# Altium footprint library Tony_.PcbLib: 94 footprints (part 6 of 6)
Each footprint in its own frame and in the unit in brackets; x right, y up, seen from the top. Pads: shape width x height; smd on the part's side, far side on the other; paste and mask are expansions set on the pad; w line width, h text height; cw(c..) or ccw(c..) is an arc to the next point about the centre after c.
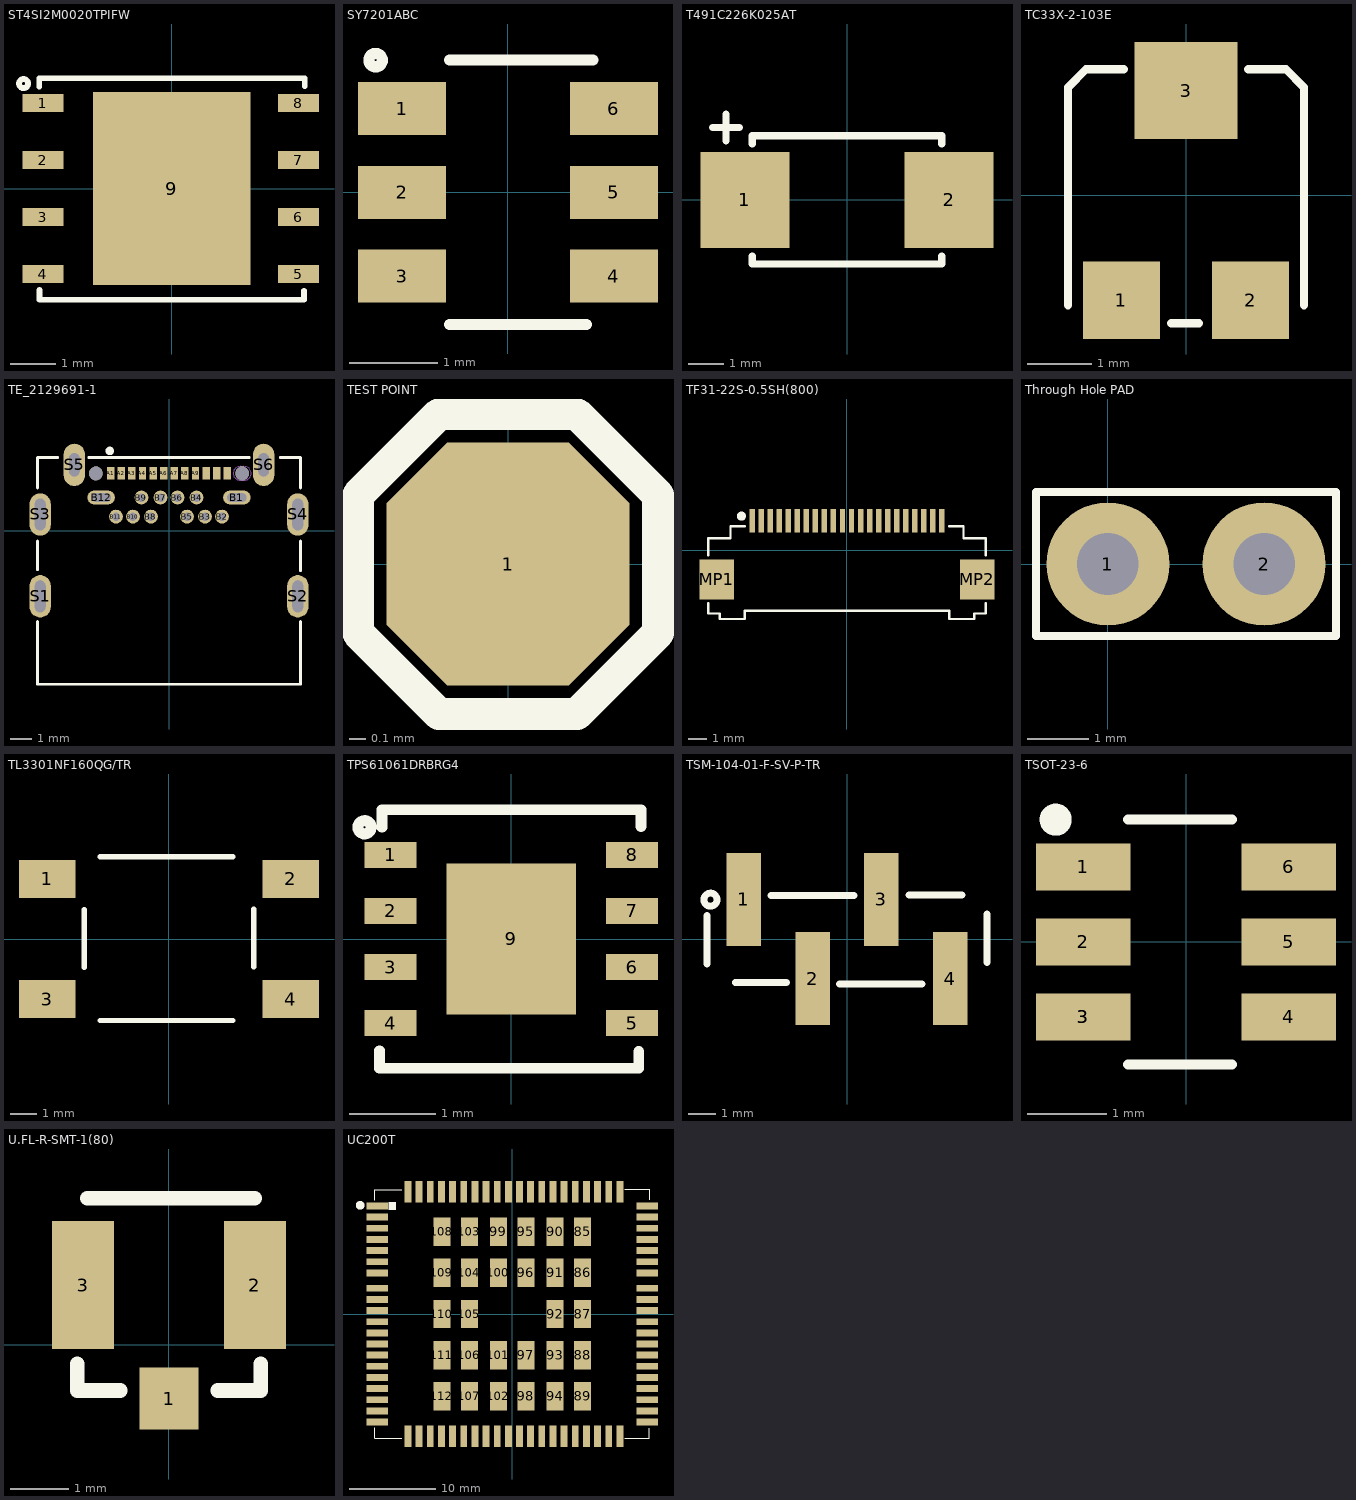
[diagram p5: the footprints below, top view; thin cyan lines are the x and y axes]

## ST4SI2M0020TPIFW [mil] "GSMA ESIM SYSTEM-ON-CHIP FOR SEC"
pads (9):
  rect 36x16 smd: 1(-113,75) 2(-113,25) 3(-113,-25) 4(-113,-75) 5(111,-75) 6(111,-25) 7(111,25) 8(111,75)
  rect 138x169 smd: 9(0,0)
Top Overlay:
  circle w5: c-130,92 r4
  lines w5: -116.18,89.2 -116.18,96.65 116.54,96.65 116.54,89.76 ; -116.11,-88.93 -116.11,-97.42 115.89,-97.42 115.89,-89.49
3D body "SON_IM-200M_STM.step": height 39.09, standoff 0, extent -117.99,-98.5 118,98.51

## SY7201ABC [mm] "SOT-23-6 LED Drivers ROHS"
pads (6):
  rect 1x0.6 smd: 1(-1.2,0.95) 2(-1.2,0) 3(-1.2,-0.95) 4(1.2,-0.95) 5(1.2,0) 6(1.2,0.95)
Top Overlay:
  circle w0.127: c-1.5,1.499 r0.076
  lines w0.127: -0.662,-1.499 0.887,-1.499 ; -0.662,1.499 0.964,1.499
3D body "User Library-SOT23-6-2.step": height 1.44, standoff -0.01, extent -1.4,-1.45 1.4,1.45

## T491C226K025AT [mm]
pads (2):
  rect 2.5x2.7 smd: 1(-2.87,0) 2(2.87,0)
Top Overlay:
  lines w0.2: -3.785,2.032 -3.023,2.032 ; -3.404,1.651 -3.404,2.413 ; -2.667,-1.575 -2.667,-1.803 2.667,-1.803 2.667,-1.575 ; -2.667,1.575 -2.667,1.803 2.667,1.803 2.667,1.575
3D body "User Library-CAP_TANT_6032-28_y.step": height 2.8, standoff 0, extent -3.15,-1.75 3.15,1.75

## TC33X-2-103E [mm]
pads (3):
  rect 1.2x1.2 smd: 1(-1,-1.625) 2(1,-1.625)
  rect 1.6x1.5 smd: 3(0,1.625)
Top Overlay:
  lines w0.127: -1.829,-1.702 -1.829,1.676 -1.549,1.956 -0.965,1.956 ; -0.229,-1.981 0.203,-1.981 ; 0.965,1.956 1.549,1.956 1.829,1.676 1.829,-1.702
3D body "TC-33X-2.stp": height 1.13, standoff -0.02, extent -1.8,-1.912 1.8,2.05

## TE_2129691-1 [mm]
pads (32):
  rect 0.35x0.6 smd: A1(-2.75,2.7) A2(-2.25,2.7) A3(-1.75,2.7) A4(-1.25,2.7) A5(-0.75,2.7) A6(-0.25,2.7) A7(0.25,2.7) A8(0.75,2.7) A9(1.25,2.7) A10(1.75,2.7) A11(2.25,2.7) A12(2.75,2.7)
  oval 1.3x0.65 hole 0.4 slot 0.9 at 0 deg: B1(3.2,1.56) B12(-3.2,1.56)
  round 0.65 hole 0.4: B2(2.5,0.66) B3(1.7,0.66) B4(1.3,1.56) B5(0.85,0.66) B6(0.4,1.56) B7(-0.4,1.56) B8(-0.85,0.66) B9(-1.3,1.56) B10(-1.7,0.66) B11(-2.5,0.66)
  oval 1x2 hole 0.5 slot 1.5 at 90 deg: S1(-6.075,-3.1) S2(6.075,-3.1) S3(-6.075,0.76) S4(6.075,0.76)
  oval 1x2 hole 0.5 slot 1.1 at 90 deg: S5(-4.465,3.1) S6(4.465,3.1)
  round 0.65 hole 0.65 unplated: ""(-3.45,2.7) ""(3.45,2.7)
Top Overlay:
  circle w0.2: c-2.794,3.759 r0.1
  lines w0.127: -6.2,-4.29 -6.2,-7.25 6.2,-7.25 6.2,-4.29 ; -6.2,-1.84 -6.2,-0.49 ; -6.2,2.01 -6.2,3.45 -5.25,3.45 ; -3.78,3.45 3.78,3.45 ; 5.25,3.45 6.2,3.45 6.2,2.01 ; 6.2,-1.89 6.2,-0.49
Mechanical 1:
  lines w0: 3.025,2.698 cw(c3.357,2.693) 3.363,3.025 ; 3.025,2.702 ccw(c3.357,2.708) 3.363,2.375 ; 3.365,2.375 3.535,2.375 ; 3.365,3.025 3.535,3.025 ; 3.537,2.375 ccw(c3.542,2.708) 3.875,2.702 ; 3.537,3.025 cw(c3.542,2.693) 3.875,2.698
3D body "2129691-1--3DModel-STEP-56544.STEP": height 2.25, standoff -1.08, extent -6.175,-7.204 6.175,3.496

## TEST POINT [mil]
pads (1):
  oct 60x60 smd: 1(0,0)
Top Overlay:
  lines w7.87: -17,-37 17,-37 ; -17,-37 -37,-17 -37,17 -17,37 ; -17,-37 17,-37 ; -17,37 17,37 ; -17,37 17,37 ; 17,-37 37,-17 37,17 17,37

## TF31-22S-0.5SH(800) [mm] "CONN FFC 22POS 0.50MM SMD"
pads (24):
  rect 0.3x1.3 smd: 1(-5.25,1.625) 2(-4.75,1.625) 3(-4.25,1.625) 4(-3.75,1.625) 5(-3.25,1.625) 6(-2.75,1.625) 7(-2.25,1.625) 8(-1.75,1.625) 9(-1.25,1.625) 10(-0.75,1.625) 11(-0.25,1.625) 12(0.25,1.625) 13(0.75,1.625) 14(1.25,1.625) 15(1.75,1.625) 16(2.25,1.625) 17(2.75,1.625) 18(3.25,1.625) 19(3.75,1.625) 20(4.25,1.625) 21(4.75,1.625) 22(5.25,1.625)
  rect 1.9x2.2 smd: MP1(-7.2,-1.625) MP2(7.2,-1.625)
Top Overlay:
  circle w0.254: c-5.842,1.88 r0.127
  lines w0.127: -7.671,-2.946 -7.671,-3.505 -7.036,-3.505 -7.036,-3.81 -5.664,-3.81 -5.664,-3.353 5.664,-3.353 5.664,-3.81 7.036,-3.81 7.036,-3.505 7.671,-3.505 7.671,-2.946 ; -7.671,-0.277 -7.671,0.66 -6.452,0.66 -6.452,1.321 -5.639,1.321 ; 5.639,1.321 6.452,1.321 6.452,0.66 7.671,0.66 7.671,-0.277
3D body "TF31-22S-0.5SH_3d_stp.stp": height 1.97, standoff -0.03, extent -7.65,-3.785 7.65,1.966

## Through Hole PAD [mm]
pads (2):
  round 2 hole 1: 1(0,0) 2(2.54,0)
Top Overlay:
  lines w0.127: -1.168,-1.168 3.708,-1.168 3.708,1.168 -1.168,1.168 -1.168,-1.168

## TL3301NF160QG/TR [mm] "Tactile Switch SPST-NO Top Actuated Surface Mount"
pads (4):
  rect 2.12x1.42 smd: 1(-4.55,2.25) 2(4.55,2.25) 3(-4.55,-2.25) 4(4.55,-2.25)
Top Overlay:
  lines w0.2: -3.175,-1.067 -3.175,1.092 ; -2.565,-3.048 2.388,-3.048 ; -2.565,3.073 2.388,3.073 ; 3.175,-1.041 3.175,1.118
3D body "TL3301NFxxxxG.stp": height 4.41, standoff 0.01, extent -5,-3 5,3

## TPS61061DRBRG4 [mm] "IC LED DRVR RGLTR DIM 400MA 8SON"
pads (9):
  rect 0.6x0.3 smd: 1(-1.4,0.975) 2(-1.4,0.325) 3(-1.4,-0.325) 4(-1.4,-0.975) 5(1.4,-0.975) 6(1.4,-0.325) 7(1.4,0.325) 8(1.4,0.975)
  rect 1.5x1.75 smd: 9(0,0)
Top Overlay:
  circle w0.127: c-1.702,1.295 r0.076
  lines w0.127: -1.527,-1.295 -1.527,-1.499 1.477,-1.499 1.477,-1.302 ; -1.499,1.295 -1.499,1.499 1.506,1.499 1.506,1.302
3D body "TPS61061DRBRG4.STEP": height 1, standoff 0, extent -1.5,-1.5 1.5,1.5

## TSM-104-01-F-SV-P-TR [mm]
pads (4):
  rect 1.27x3.43 smd: 1(-3.81,1.46) 2(-1.27,-1.46) 3(1.27,1.46) 4(3.81,-1.46)
Top Overlay:
  circle w0.254: c-5.029,1.448 r0.241
  lines w0.254: -5.156,-0.914 -5.156,0.864 ; -4.115,-1.6 -2.235,-1.6 ; -2.794,1.6 0.254,1.6 ; -0.279,-1.651 2.769,-1.651 ; 2.286,1.626 4.242,1.626 ; 5.156,-0.864 5.156,0.914
3D body "TSM-104-01-F-SV-P-TR.stp": height 10.9, standoff -0.02, extent -5.08,-2.642 5.08,2.642

## TSOT-23-6 [mm]
pads (7):
  rect 1.2x0.6 smd: 1(-1.3,0.95) 2(-1.3,0) 3(-1.3,-0.95) 3(-1.3,-0.95) 4(1.3,-0.95) 5(1.3,0) 6(1.3,0.95)
Top Overlay:
  circle w0.254: c-1.651,1.549 r0.076
  lines w0.127: -0.737,-1.549 0.584,-1.549 ; -0.737,1.549 0.584,1.549
3D body "User Library-TSOT-23.step": height 0.86, standoff 0, extent -1.405,-1.5 1.405,1.5

## U.FL-R-SMT-1(80) [mm]
pads (3):
  rect 1.02x1.07 smd: 1(0,-0.923)
  rect 1.07x2.2 smd: 2(1.475,1.025) 3(-1.475,1.025)
Top Overlay:
  lines w0.254: -1.575,-0.33 -1.575,-0.787 -0.838,-0.787 ; -1.397,2.515 1.473,2.515 ; 0.838,-0.787 1.575,-0.787 1.575,-0.33
3D body "U.FL-R-SMT-1.stp": height 1.2, standoff -0.05, extent -1.475,-0.686 1.525,2.414

## UC200T [mm]
pads (108):
  rect 2.5x0.8 smd: 1(-15.75,12.6) 2(-15.75,11.3) 3(-15.75,10) 4(-15.75,8.7) 5(-15.75,7.4) 6(-15.75,6.1) 7(-15.75,4.8) 8(-15.75,0.4) 9(-15.75,-0.9) 10(-15.75,-2.2) 11(-15.75,-3.5) 12(-15.75,-4.8) 13(-15.75,-6.1) 14(-15.75,-7.4) 15(-15.75,-8.7) 16(-15.75,-10) 17(-15.75,-11.3) 18(-15.75,-12.6) 37(15.75,-12.6) 38(15.75,-11.3) 39(15.75,-10) 40(15.75,-8.7) 41(15.75,-7.4) 42(15.75,-6.1) 43(15.75,-4.8) 44(15.75,-3.5) 45(15.75,-2.2) 46(15.75,-0.9) 47(15.75,0.4) 48(15.75,4.8) 49(15.75,6.1) 50(15.75,7.4) 51(15.75,8.7) 52(15.75,10) 53(15.75,11.3) 54(15.75,12.6) 141(-15.75,3) 142(-15.75,1.7) 143(15.75,1.7) 144(15.75,3)
  rect 0.8x2.5 smd: 19(-9.55,-14.25) 20(-8.25,-14.25) 21(-6.95,-14.25) 22(-5.65,-14.25) 23(-4.35,-14.25) 24(-3.05,-14.25) 25(-1.75,-14.25) 26(-0.45,-14.25) 27(0.85,-14.25) 28(2.15,-14.25) 29(3.45,-14.25) 30(4.75,-14.25) 31(6.05,-14.25) 32(7.35,-14.25) 33(8.65,-14.25) 34(9.95,-14.25) 35(11.25,-14.25) 36(12.55,-14.25) 55(12.55,14.25) 56(11.25,14.25) 57(9.95,14.25) 58(8.65,14.25) 59(7.35,14.25) 60(6.05,14.25) 61(4.75,14.25) 62(3.45,14.25) 63(2.15,14.25) 64(0.85,14.25) 65(-0.45,14.25) 66(-1.75,14.25) 67(-3.05,14.25) 68(-4.35,14.25) 69(-5.65,14.25) 70(-6.95,14.25) 71(-8.25,14.25) 72(-9.55,14.25) 113(-10.85,14.25) 114(-12.15,14.25) 115(-10.85,-14.25) 116(-12.15,-14.25)
  rect 2x3.3 smd: 85(8.2,9.6) 86(8.2,4.8) 87(8.2,0) 88(8.2,-4.8) 89(8.2,-9.6) 90(5,9.6) 91(5,4.8) 92(5,0) 93(5,-4.8) 94(5,-9.6) 95(1.6,9.6) 96(1.6,4.8) 97(1.6,-4.8) 98(1.6,-9.6) 99(-1.6,9.6) 100(-1.6,4.8) 101(-1.6,-4.8) 102(-1.6,-9.6) 103(-5,9.6) 104(-5,4.8) 105(-5,0) 106(-5,-4.8) 107(-5,-9.6) 108(-8.2,9.6) 109(-8.2,4.8) 110(-8.2,0) 111(-8.2,-4.8) 112(-8.2,-9.6)
Top Overlay:
  circle w0.5: c-17.729,12.675 r0.254
  rectangle: -14.402,12.116 -13.564,13.081
  lines w0.127: -16.03,-13.259 -16.03,-14.498 -12.852,-14.498 ; -16.029,13.259 -16.029,14.511 -12.852,14.511 ; 13.132,-14.483 15.979,-14.483 15.979,-13.31 ; 13.132,14.527 16.013,14.527 16.013,13.31
3D body "uc200t-xx_asm.stp": height 2.4, standoff 0, extent -16,-14.5 16,14.5